# Altium footprint library PcbLib.PcbLib: 65 footprints (part 5 of 5)
Each footprint in its own frame and in the unit in brackets; x right, y up, seen from the top. Pads: shape width x height; smd on the part's side, far side on the other; paste and mask are expansions set on the pad; w line width, h text height; cw(c..) or ccw(c..) is an arc to the next point about the centre after c.
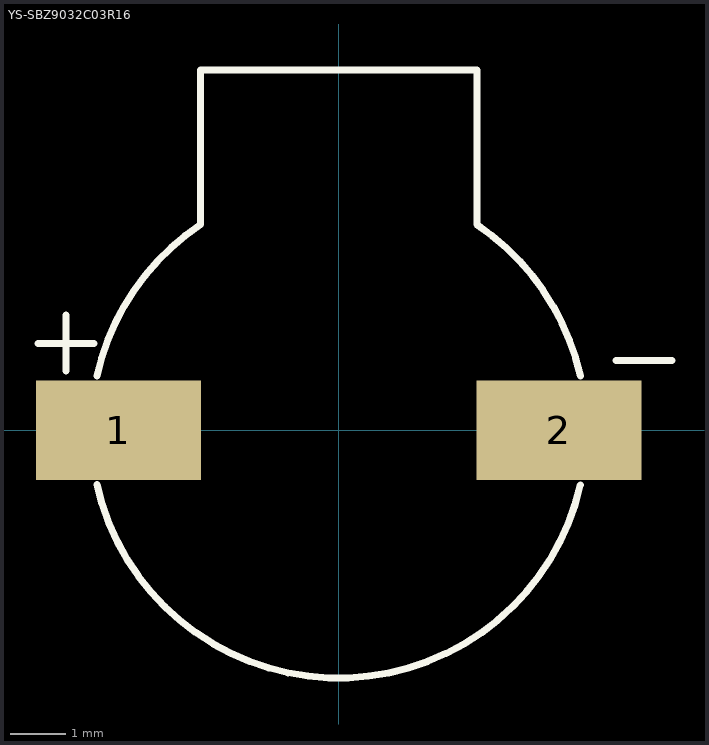
[diagram p4: the footprint, top view; thin cyan lines are the x and y axes]

## YS-SBZ9032C03R16 [mm] "NO 2700Hz 85dB @ 3V, 10cm 3V F9mm SMD,9x3.2mm Buzzers RoHS"
pads (2):
  rect 3x1.8 smd: 1(-4,0) 2(4,0)
Top Overlay:
  lines w0.127: -5.461,1.575 -4.445,1.575 ; -4.953,1.075 -4.953,2.091 ; -4.391,-0.984 ccw(c0,0) 4.389,-0.992 ; -4.391,0.984 cw(c0,0) -2.51,3.735 -2.51,6.543 2.51,6.543 2.51,3.735 cw(c0,0) 4.391,0.984 ; 5.042,1.27 6.058,1.27
3D body "YS-SBZ9032C03R16.STEP": height 3.3, standoff 0, extent -5.25,-4.5 5.25,6.5